# Altium schematic symbol library PI3L720ZHEX.SchLib: 1 symbol
Pins are listed as number, name and electrical type; pins without a type are passive.

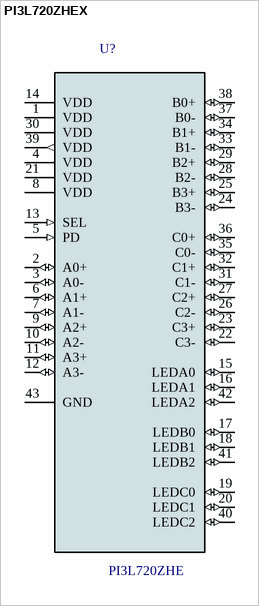
[diagram p0: symbol PI3L720ZHEX]

## PI3L720ZHEX
designator U?, comment PI3L720ZHE
16-Bit to 8-Bit Multiplexer/Demultiplexer Gigabit Ethernet LAN Switch with Power Down Mode 42-WQFN -40 to 85; MP: TS3L501ERUAR; MF: Texas Instruments; SnapEDA_Link: https://www.snapeda.com/parts/TS3L501ERUAR/Texas%20Instruments/view-part/?ref=snap; Price: None; Availability: Unavailable; Package: WQFN-42 Texas Instruments; Value: *
footprint PI3L720ZHEX (QFN50P350X900X80-43N)
pins: 1 VDD (power), 2 A0+ (io), 3 A0- (io), 4 VDD (power), 5 PD (in), 6 A1+ (io), 7 A1- (io), 8 VDD (power), 9 A2+ (io), 10 A2- (io), 11 A3+ (io), 12 A3- (io), 13 SEL (in), 14 VDD (power), 15 LEDA0 (io), 16 LEDA1 (io), 17 LEDB0 (io), 18 LEDB1 (io), 19 LEDC0 (io), 20 LEDC1 (io), 21 VDD (power), 22 C3- (io), 23 C3+ (io), 24 B3- (io), 25 B3+ (io), 26 C2- (io), 27 C2+ (io), 28 B2- (io), 29 B2+ (io), 30 VDD (power), 31 C1- (io), 32 C1+ (io), 33 B1- (io), 34 B1+ (io), 35 C0- (io), 36 C0+ (io), 37 B0- (io), 38 B0+ (io), 39 VDD (out), 40 LEDC2 (io), 41 LEDB2 (io), 42 LEDA2 (io), 43 GND